# EAGLE library part CON_MICROSD_47571-001 (library dp_devices.v6)
MOLEX SD-47571-001
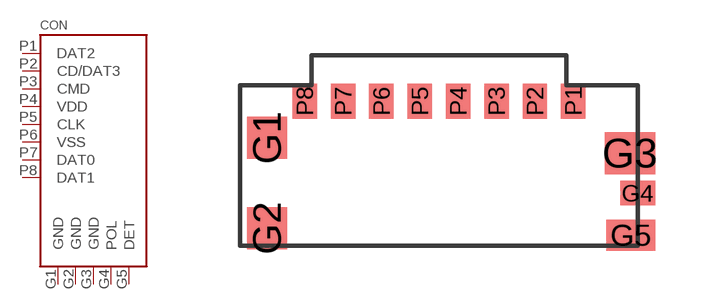
[diagram p171: symbol with the pads of CON_SD_47571-001; footprint CON_SD_47571-001]

Designator prefix CON

## CON_MICROSD_47571-001  [CON_SD_47571-001]
G1  GND
G2  GND
G3  GND
G4  POL
G5  DET
P1  DAT2
P2  CD/DAT3
P3  CMD
P4  VDD
P5  CLK
P6  VSS
P7  DAT0
P8  DAT1

## Footprint CON_SD_47571-001 (pad centres in mm)
MOLEX SD-47571-001
smd 1.15 x 1.2: G1 -4.925,-1.05; G2 -4.925,-3.64
smd 1.45 x 1.2: G3 5.475,-1.49
smd 1 x 0.7: G4 5.7,-2.64
smd 1.4 x 0.9: G5 5.5,-3.845
smd 0.7 x 1: P1 3.85,0; P2 2.75,0; P3 1.65,0; P4 0.55,0; P5 -0.55,0; P6 -1.65,0; P7 -2.75,0; P8 -3.85,0